# Altium schematic symbol library SamacSys.SchLib: 6 symbols
Pins are listed as number, name and electrical type; pins without a type are passive.

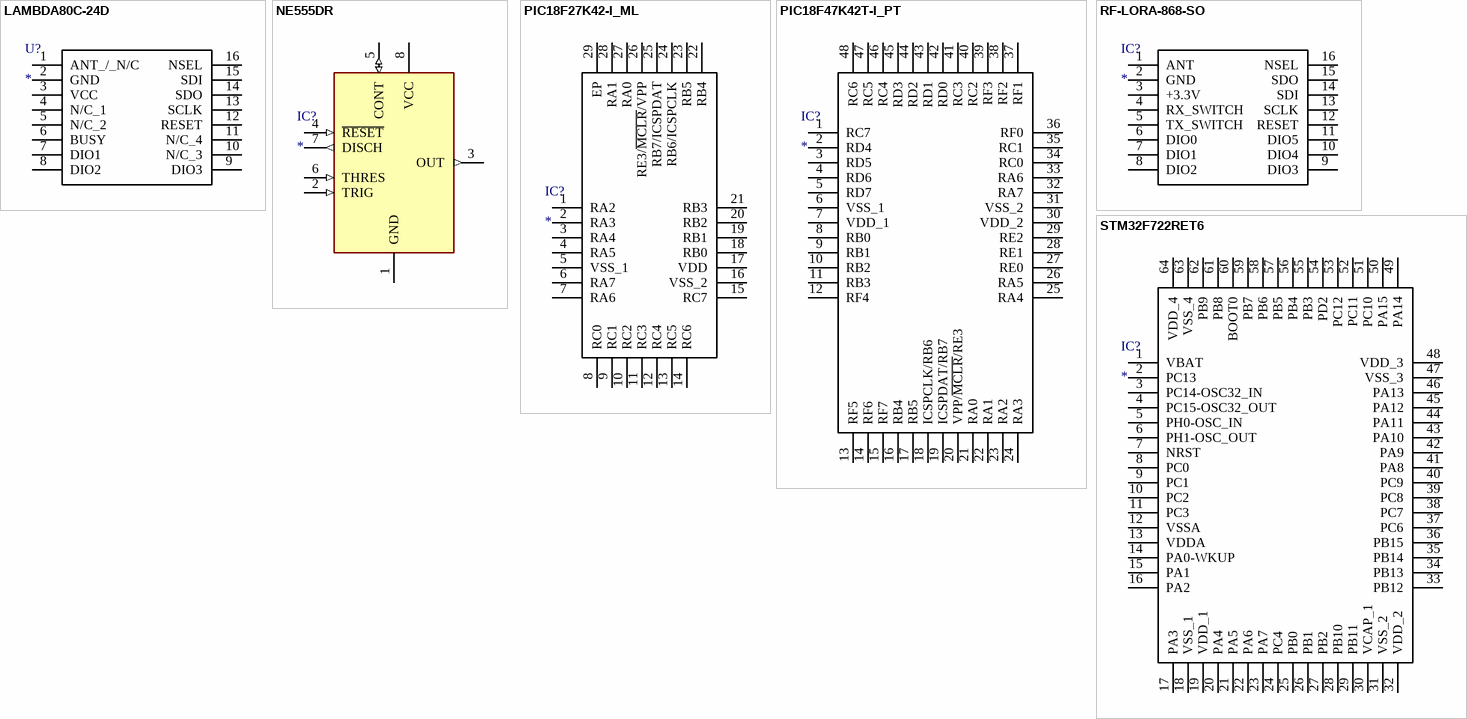
[diagram p0: symbols LAMBDA80C-24D to STM32F722RET6]

## LAMBDA80C-24D
designator U?
Undefined or Miscellaneous; Manufacturer_Name: RF SOLUTIONS; Manufacturer_Part_Number: LAMBDA80C-24D; Datasheet Link: https://www.rfsolutions.co.uk/downloads/6245d8c44da69987DS-LAMBDA80-1.pdf; Height: 5.81mm; Mouser Part Number: 223-LAMBDA80C-24D; Mouser Price/Stock: https://www.mouser.co.uk/ProductDetail/RF-Solutions/LAMBDA80C-24D?qs=17u8i%2FzlE88KPwQQfuaDFw%3D%3D; Arrow Part Number: LAMBDA80C-24D; Arrow Price/Stock: null?region=nac
footprint LAMBDA80C24D
pins: 1 ANT_/_N/C, 2 GND, 3 VCC, 4 N/C_1, 5 N/C_2, 6 BUSY, 7 DIO1, 8 DIO2, 9 DIO3, 10 N/C_3, 11 N/C_4, 12 RESET, 13 SCLK, 14 SDO, 15 SDI, 16 NSEL

## NE555DR
designator IC?
Integrated Circuit; Manufacturer_Name: Texas Instruments; Manufacturer_Part_Number: NE555DR; Datasheet Link: http://www.ti.com/lit/ds/symlink/ne555.pdf; Height: 1.75mm; Mouser Part Number: 595-NE555DR; Mouser Price/Stock: https://www.mouser.com/Search/Refine.aspx?Keyword=595-NE555DR; RS Part Number: 1218414; RS Price/Stock: http://uk.rs-online.com/web/p/products/1218414
footprint SOIC127P600X175-8N
pins: 1 GND (power), 2 TRIG (in), 3 OUT (out), 4 ~{RESET} (in), 5 CONT (io), 6 THRES (in), 7 DISCH (out), 8 VCC (power)

## PIC18F27K42-I_ML
designator IC?
Integrated Circuit; Manufacturer_Name: Microchip; Manufacturer_Part_Number: PIC18F27K42-I/ML; Datasheet Link: https://www.microchip.com/wwwproducts/en/PIC18F27K42; Height: 1mm; Mouser Part Number: 579-PIC18F27K42-I/ML; Mouser Price/Stock: https://www.mouser.co.uk/ProductDetail/Microchip-Technology/PIC18F27K42-I-ML?qs=f9yNj16SXrJ4LRrGhimNPQ%3D%3D; Arrow Part Number: PIC18F27K42-I/ML; Arrow Price/Stock: https://www.arrow.com/en/products/pic18f27k42-iml/microchip-technology?region=nac
footprint QFN65P600X600X100-29N-D
pins: 1 RA2, 2 RA3, 3 RA4, 4 RA5, 5 VSS_1, 6 RA7, 7 RA6, 8 RC0, 9 RC1, 10 RC2, 11 RC3, 12 RC4, 13 RC5, 14 RC6, 15 RC7, 16 VSS_2, 17 VDD, 18 RB0, 19 RB1, 20 RB2, 21 RB3, 22 RB4, 23 RB5, 24 RB6/ICSPCLK, 25 RB7/ICSPDAT, 26 RE3/~{MCLR}/VPP, 27 RA0, 28 RA1, 29 EP

## PIC18F47K42T-I_PT
designator IC?
Integrated Circuit; Manufacturer_Name: Microchip; Manufacturer_Part_Number: PIC18F47K42T-I/PT; Datasheet Link: http://www.microchip.com/mymicrochip/filehandler.aspx?ddocname=en598760; Height: 1.2mm; Mouser Part Number: 579-PIC18F47K42TIPT; Mouser Price/Stock: https://www.mouser.co.uk/ProductDetail/Microchip-Technology/PIC18F47K42T-I-PT?qs=f9yNj16SXrJliwtV0QFwbQ%3D%3D; Arrow Part Number: PIC18F47K42T-I/PT; Arrow Price/Stock: https://www.arrow.com/en/products/pic18f47k42t-ipt/microchip-technology?region=nac
footprint QFP50P900X900X120-48N
pins: 1 RC7, 2 RD4, 3 RD5, 4 RD6, 5 RD7, 6 VSS_1, 7 VDD_1, 8 RB0, 9 RB1, 10 RB2, 11 RB3, 12 RF4, 13 RF5, 14 RF6, 15 RF7, 16 RB4, 17 RB5, 18 ICSPCLK/RB6, 19 ICSPDAT/RB7, 20 VPP/~{MCLR}/RE3, 21 RA0, 22 RA1, 23 RA2, 24 RA3, 25 RA4, 26 RA5, 27 RE0, 28 RE1, 29 RE2, 30 VDD_2, 31 VSS_2, 32 RA7, 33 RA6, 34 RC0, 35 RC1, 36 RF0, 37 RF1, 38 RF2, 39 RF3, 40 RC2, 41 RC3, 42 RD0, 43 RD1, 44 RD2, 45 RD3, 46 RC4, 47 RC5, 48 RC6

## RF-LORA-868-SO
designator IC?
Integrated Circuit; Manufacturer_Name: RF SOLUTIONS; Manufacturer_Part_Number: RF-LORA-868-SO; Datasheet Link: http://uk.rs-online.com/web/p/lower-power-rf-modules/9033059/; Mouser Part Number: 223-RF-LORA-868-SO; Mouser Price/Stock: https://www.mouser.co.uk/ProductDetail/RF-Solutions/RF-LORA-868-SO?qs=17u8i%2FzlE8%252BiEH%252BTI1JxeA%3D%3D
footprint RF-LORA-868-SO_1
pins: 1 ANT, 2 GND, 3 +3.3V, 4 RX_SWITCH, 5 TX_SWITCH, 6 DIO0, 7 DIO1, 8 DIO2, 9 DIO3, 10 DIO4, 11 DIO5, 12 RESET, 13 SCLK, 14 SDI, 15 SDO, 16 NSEL

## STM32F722RET6
designator IC?
Integrated Circuit; Manufacturer_Name: STMicroelectronics; Manufacturer_Part_Number: STM32F722RET6; Description: ARM Microcontrollers - MCU High-performance and DSP with FPU; Datasheet Link: https://www.st.com/resource/en/datasheet/stm32f722ic.pdf; Height: 1.6mm; Mouser Part Number: 511-STM32F722RET6; Mouser Price/Stock: https://www.mouser.co.uk/ProductDetail/STMicroelectronics/STM32F722RET6?qs=NoqMqJKvPFLRYC3WLxVXLQ%3D%3D; Arrow Part Number: STM32F722RET6; Arrow Price/Stock: https://www.arrow.com/en/products/stm32f722ret6/stmicroelectronics?utm_currency=USD&region=nac
footprint QFP50P1200X1200X160-64N
pins: 1 VBAT, 2 PC13, 3 PC14-OSC32_IN, 4 PC15-OSC32_OUT, 5 PH0-OSC_IN, 6 PH1-OSC_OUT, 7 NRST, 8 PC0, 9 PC1, 10 PC2, 11 PC3, 12 VSSA, 13 VDDA, 14 PA0-WKUP, 15 PA1, 16 PA2, 17 PA3, 18 VSS_1, 19 VDD_1, 20 PA4, 21 PA5, 22 PA6, 23 PA7, 24 PC4, 25 PB0, 26 PB1, 27 PB2, 28 PB10, 29 PB11, 30 VCAP_1, 31 VSS_2, 32 VDD_2, 33 PB12, 34 PB13, 35 PB14, 36 PB15, 37 PC6, 38 PC7, 39 PC8, 40 PC9, 41 PA8, 42 PA9, 43 PA10, 44 PA11, 45 PA12, 46 PA13, 47 VSS_3, 48 VDD_3, 49 PA14, 50 PA15, 51 PC10, 52 PC11, 53 PC12, 54 PD2, 55 PB3, 56 PB4, 57 PB5, 58 PB6, 59 PB7, 60 BOOT0, 61 PB8, 62 PB9, 63 VSS_4, 64 VDD_4